# EAGLE library part Conn_Wire_Pads_1x08 (library JR)
8 plated holes, 2.54 mm, 1.0 mm drill: solder wires (or a 1x8 header)
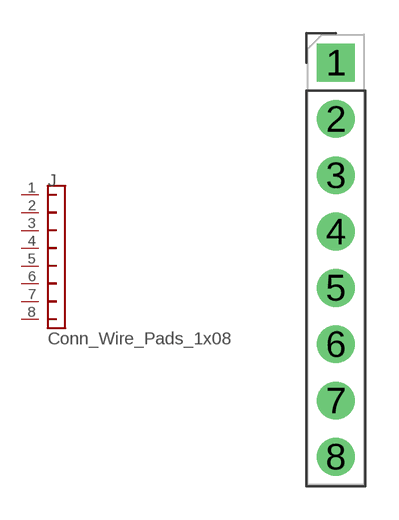
[diagram p2: symbol with the pads of PinHeader_1x08_P2.54mm_Vertical; footprint PinHeader_1x08_P2.54mm_Vertical]

Designator prefix J

## Conn_Wire_Pads_1x08 (DESCRIPTION: 8 plated holes, 2.54 mm, 1.0 mm drill: solder wires (or a 1x8 header))  [PinHeader_1x08_P2.54mm_Vertical]
1  1  pas
2  2  pas
3  3  pas
4  4  pas
5  5  pas
6  6  pas
7  7  pas
8  8  pas

## Footprint PinHeader_1x08_P2.54mm_Vertical (pad centres in mm)
Through hole straight pin header, 1x08, 2.54mm pitch, single row
drill 1 pad 1.7 square: 1 0,0
drill 1 pad 1.7 round: 2 0,-2.54; 3 0,-5.08; 4 0,-7.62; 5 0,-10.16; 6 0,-12.7; 7 0,-15.24; 8 0,-17.78